# Altium footprint library PCA9306DP1_125.PcbLib: 1 footprints
Each footprint in its own frame and in the unit in brackets; x right, y up, seen from the top. Pads: shape width x height; smd on the part's side, far side on the other; paste and mask are expansions set on the pad; w line width, h text height; cw(c..) or ccw(c..) is an arc to the next point about the centre after c.
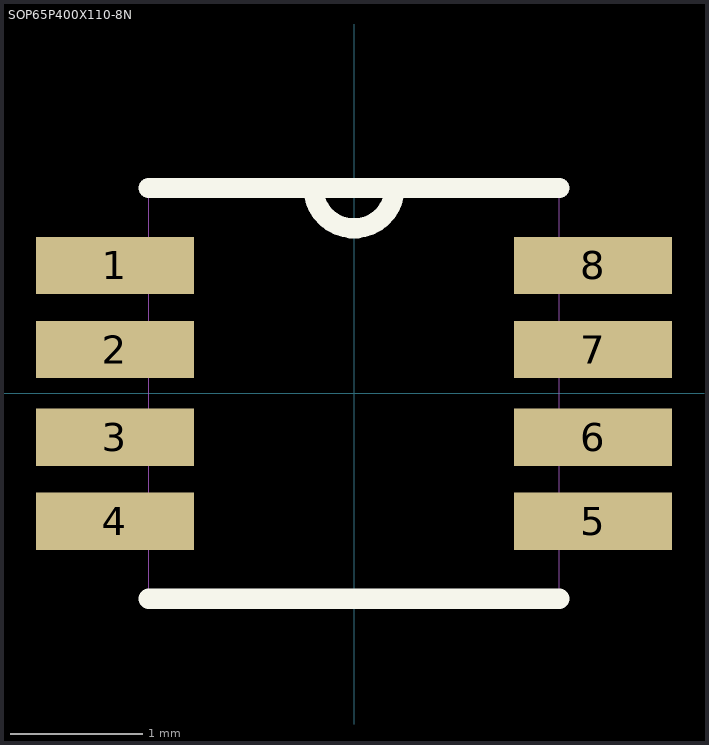
[diagram p0: the footprint, top view; thin cyan lines are the x and y axes]

## SOP65P400X110-8N [mil]
pads (8):
  rect 47x17 smd: 1(-71,38) 2(-71,13) 3(-71,-13) 4(-71,-38) 5(71,-38) 6(71,-13) 7(71,13) 8(71,38)
Top Overlay:
  lines w6: -61,-61 61,-61 ; -61,61 -12,61 ; 61,61 12,61 ; -12,61 ccw(c0,61) 12,61 ; -12,61 12,61
Assembly Top:
  lines w0: -12,61 ccw(c0,61) 12,61 ; -12,61 -61,61 -61,-61 61,-61 61,61 12,61 ; -12,61 12,61 ; -81,-46 -61,-46 -61,-31 -81,-31 -81,-46 ; -81,-20 -61,-20 -61,-5 -81,-5 -81,-20 ; -81,5 -61,5 -61,20 -81,20 -81,5 ; -81,31 -61,31 -61,46 -81,46 -81,31 ; 61,-46 81,-46 81,-31 61,-31 61,-46 ; 61,-20 81,-20 81,-5 61,-5 61,-20 ; 61,5 81,5 81,20 61,20 61,5 ; 61,31 81,31 81,46 61,46 61,31
3D body "step_temp.STEP": height 43.31, standoff 0, extent -96.46,-59.06 96.46,59.06